# Altium schematic symbol library Schlib_IDC_Tester_v1.SchLib: 21 symbols
Pins are listed as number, name and electrical type; pins without a type are passive.

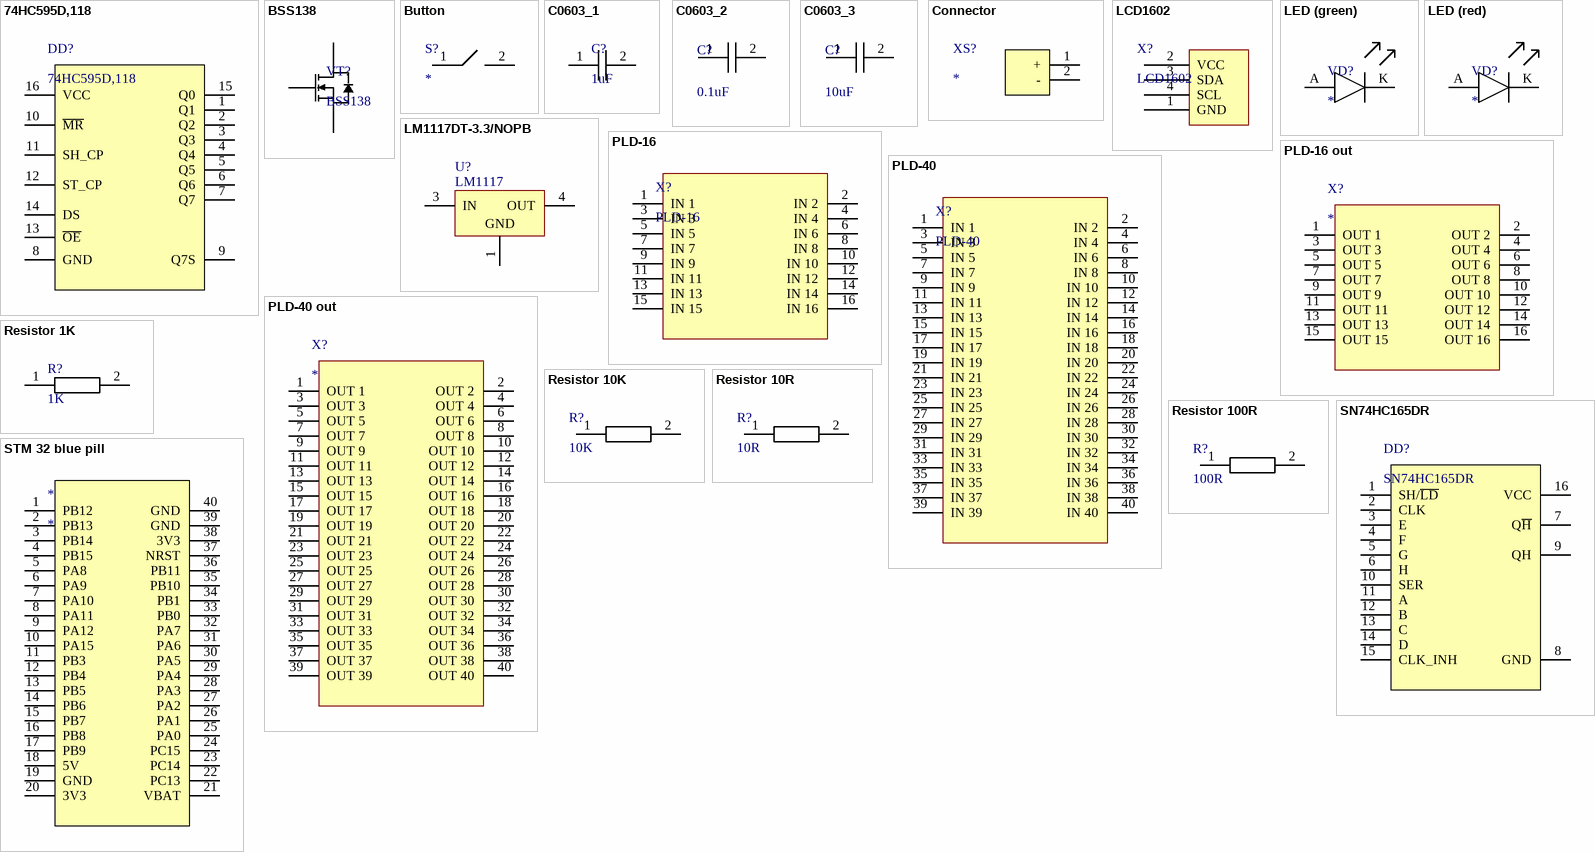
[diagram p0: symbols 74HC595D,118 to STM 32 blue pill]

## 74HC595D,118
designator DD?
74HC Series 6 V 3-State Surface Mount Shift Register - SOIC-16; Manufacturer: Nexperia; Added by: viskov2055@gmail.com; Mount_Type: SMD; Solder_Amount: 16; Supplier 1: Rs; Manufacturer Part Number: 74HC595D,118; RoHS: Yes; Category: Shift Registers; Stock 1: 7500; Pricing 1: 2500=32,44, 5000=31,895 (RUB); ComponentLink1URL: http://www.farnell.com/datasheets/2038613.pdf?src-supplier=Farnell; ComponentLink1Description: http://www.farnell.com/datasheets/2038613.pdf?src-supplier=Farnell; ComponentLink2URL: https://assets.nexperia.com/documents/data-sheet/74HC_HCT595.pdf?src-supplier=Digikey; ComponentLink2Description: https://assets.nexperia.com/documents/data-sheet/74HC_HCT595.pdf?src-supplier=Digikey; ComponentLink3URL: https://datasheet.octopart.com/74HC595D%2C118-Nexperia-datasheet-62292421.pdf?src-supplier=Newark; ComponentLink3Description: https://datasheet.octopart.com/74HC595D%2C118-Nexperia-datasheet-62292421.pdf?src-supplier=Newark; ComponentLink4URL: http://www.farnell.com/datasheets/2038613.pdf?src-supplier=Newark; ComponentLink4Description: http://www.farnell.com/datasheets/2038613.pdf?src-supplier=Newark; ComponentLink5URL: http://www.farnell.com/datasheets/2038613.pdf?src-supplier=Element14; ComponentLink5Description: http://www.farnell.com/datasheets/2038613.pdf?src-supplier=Element14; ComponentLink6URL: https://datasheet.octopart.com/74HC595D%2C118-Nexperia-datasheet-11979826.pdf?src-supplier=Element14; ComponentLink6Description: https://datasheet.octopart.com/74HC595D%2C118-Nexperia-datasheet-11979826.pdf?src-supplier=Element14; Supplier Part Number 1: 1707956; Created at: 13/02/2024; Mount: MOUNT; Pkg: SOIC-16; Part Number: 74HC595D,118
footprint Shift register 74HC165 or 74HC595
pins: 1 Q1, 2 Q2, 3 Q3, 4 Q4, 5 Q5, 6 Q6, 7 Q7, 8 GND, 9 Q7S, 10 ~{MR}, 11 SH_CP, 12 ST_CP, 13 ~{OE}, 14 DS, 15 Q0, 16 VCC

## BSS138
designator VT?
N-Channel Logic Level Enhancement Mode Field Effect Transistor; Solder_Amount: 3; Added_by: ma_lubushkin@teslatec.ru; Pkg: SOT-23; Part Number: BSS138; Mount: MOUNT; MountType: SMD; Created_at: 03/12/2019
footprint SOT-23-3
pins: 1 G, 2 S "fghg", 3 D
1 alternate drawing of the same symbol

## Button
designator S?
Part Number: PTS645SM43SMTR92LFS; Added by: viskov2055@gmail.com; Mpunt_Type: SMD; Solder_Amount: 4; Pkg: Button; Created at: 19/02/2024; Mount: MOUNT
footprint Button
pins: 1, 2

## C0603_1
designator C?, comment 1uF
Part Number: SMD CAP CER 1UF 25V X5R 0603 (CC0603KRX5R8BB105); Added by: viskov2055@gmail.com; Mount_Type: SMD; Solder_Amount: 2; Pkg: 0603; Created at: 16/02/2024; Mount: MOUNT
footprint Capacitor 0603
pins: 1, 2

## C0603_2
designator C?, comment 0.1uF
Capacitor SMD 0603; Part Number: CAP CER 0603 0.1uF 16V 10%; Added_by: ridel_av@teslatec.ru; Solder_Amount: 2; Pkg: 0603; Mount: MOUNT; MountType: SMD
footprint Capacitor 0603
pins: 1, 2

## C0603_3
designator C?, comment 10uF
Capacitor SMD 0603; Part Number: CAP CER 0603 10uF 16V 10%; Added_by: ridel_av@teslatec.ru; Solder_Amount: 2; Pkg: 0603; Mount: MOUNT; MountType: SMD
footprint Capacitor 0603
pins: 1, 2

## Connector
designator XS?
Part Number: 282836; Added by: viskov2055@gmail.com; Mount_Type: THM; Solder_Amount: 2; Pkg: connector (bulk); Created at: 13/02/2024; Mount: MOUNT
footprint Connector
pins: 1 +, 2 -

## LCD1602
designator X?
Part Number: LCD1602I2C (green light); Added by: viskov2055@gmail.com; Mount_Type: THM; Solder_Amount: 4; Pkg: board (connector); Created at: 19/02/2024; Mount: MOUNT
footprint LCD1602
pins: 1 GND, 2 VCC, 3 SDA, 4 SCL

## LED (green)
designator VD?
LED Uni-Color Green 515nm 2-Pin SMD T/R; Manufacturer: Kingbright; Manufacturer Part Number: APG1608ZGCK; Lens Style: Flat; Lens Transparency: Clear; Luminous Intensity: 400mcd; Forward Voltage: 3.3V; Test Current: 20mA; Viewing Angle: 130°; Dominant Wavelength: 525nm; Lens Size: 0.8mm; Added by: viskov2055@gmail.com; Solder_Amount: 2; Pkg: 0603; RoHS: Yes; Category: LEDs; Stock 1: 44996; Pricing 1: 1=0,6, 10=0,368, 100=0,2114, 1000=0,16544, 2000=0,15165 (USD); MountType: SMD; Case/Package: 0603; Color: Green; Case Code (Imperial): 0603; Case Code (Metric): 1608; Packaging: Tape and Reel; Length: 1.6mm; Width: 0.8mm; Height: 0.28mm; RoHS Compliant: Yes; ComponentLink1URL: https://datasheet.octopart.com/APG1608ZGCK-Kingbright-datasheet-153682089.pdf?src-supplier=Future+Electronics; ComponentLink1Description: https://datasheet.octopart.com/APG1608ZGCK-Kingbright-datasheet-153682089.pdf?src-supplier=Future+Electronics; ComponentLink2URL: http://www.kingbrightusa.com/images/catalog/SPEC/APG1608ZGCK.pdf?src-supplier=Digikey; ComponentLink2Description: http://www.kingbrightusa.com/images/catalog/SPEC/APG1608ZGCK.pdf?src-supplier=Digikey; ComponentLink3URL: https://datasheet.octopart.com/APG1608ZGCK-Kingbright-datasheet-137408059.pdf?src-supplier=Sager+Electronics; ComponentLink3Description: https://datasheet.octopart.com/APG1608ZGCK-Kingbright-datasheet-137408059.pdf?src-supplier=Sager+Electronics; Supplier Part Number 1: 754-2113-1-ND; Created at: 13/02/2024; Mount: MOUNT; Part Number: APG1608ZGCK; Supplier 1: Digikey
footprint Led 0603 - duplicate
pins: A 1, K 2

## LED (red)
designator VD?
Part Number: APT1608SURCK; Added by: viskov2055@gmail.com; Solder_Amount: 2; Pkg: 0603; Mount_Type: SMD; Created at: 13/02/2024; Mount: MOUNT
footprint Led 0603 RED
pins: A 1, K 2

## LM1117DT-3.3/NOPB
designator U?, comment LM1117
800mA Low-Dropout Linear Regulator, 3-pin TO-252, Pb-Free; Part Number: LM1117DT-3.3/NOPB; Added_by: ridel_av@teslatec.ru; Solder_Amount: 3; Pkg: TD03B_N; Mount: MOUNT; MountType: SMD
footprint TO-252
pins: 1 GND (power), 3 IN (power), 4 OUT (power)

## PLD-16
designator X?
Part Number: DS1021-2x8; Added by: viskov2055@gmail.com; Mount_Type: THM; Solder_Amount: 16; Created at: 13/02/2024; Mount: MOUNT; Pkg: PLD-16
footprint PLD-16
pins: 1 IN 1, 2 IN 2, 3 IN 3, 4 IN 4, 5 IN 5, 6 IN 6, 7 IN 7, 8 IN 8, 9 IN 9, 10 IN 10, 11 IN 11, 12 IN 12, 13 IN 13, 14 IN 14, 15 IN 15, 16 IN 16

## PLD-16 out
designator X?
Part Number: DS1021-2x8; Added by: viskov2055@gmail.com; Mount_Type: THM; Solder_Amount: 16; Pkg: PLD-16; Created at: 16/02/2024; Mount: MOUNT
footprint PLD-16
pins: 1 OUT 1, 2 OUT 2, 3 OUT 3, 4 OUT 4, 5 OUT 5, 6 OUT 6, 7 OUT 7, 8 OUT 8, 9 OUT 9, 10 OUT 10, 11 OUT 11, 12 OUT 12, 13 OUT 13, 14 OUT 14, 15 OUT 15, 16 OUT 16

## PLD-40
designator X?
Part Number: DS1021-2x20; Added by: viskov2055@gmail.com; Mount_Type: THM; Solder_Amount: 40; Created at: 13/02/2024; Mount: MOUNT; Pkg: PLD-40
footprint PLD-40
pins: 1 IN 1, 2 IN 2, 3 IN 3, 4 IN 4, 5 IN 5, 6 IN 6, 7 IN 7, 8 IN 8, 9 IN 9, 10 IN 10, 11 IN 11, 12 IN 12, 13 IN 13, 14 IN 14, 15 IN 15, 16 IN 16, 17 IN 17, 18 IN 18, 19 IN 19, 20 IN 20, 21 IN 21, 22 IN 22, 23 IN 23, 24 IN 24, 25 IN 25, 26 IN 26, 27 IN 27, 28 IN 28, 29 IN 29, 30 IN 30, 31 IN 31, 32 IN 32, 33 IN 33, 34 IN 34, 35 IN 35, 36 IN 36, 37 IN 37, 38 IN 38, 39 IN 39, 40 IN 40

## PLD-40 out
designator X?
Part Number: DS1021-2x20; Added by: viskov2055@gmail.com; Mount_Type: THM; Solder_Amount: 40; Pkg: PLD-40; Created at: 16/02/2024; Mount: MOUNT
footprint PLD-40
pins: 1 OUT 1, 2 OUT 2, 3 OUT 3, 4 OUT 4, 5 OUT 5, 6 OUT 6, 7 OUT 7, 8 OUT 8, 9 OUT 9, 10 OUT 10, 11 OUT 11, 12 OUT 12, 13 OUT 13, 14 OUT 14, 15 OUT 15, 16 OUT 16, 17 OUT 17, 18 OUT 18, 19 OUT 19, 20 OUT 20, 21 OUT 21, 22 OUT 22, 23 OUT 23, 24 OUT 24, 25 OUT 25, 26 OUT 26, 27 OUT 27, 28 OUT 28, 29 OUT 29, 30 OUT 30, 31 OUT 31, 32 OUT 32, 33 OUT 33, 34 OUT 34, 35 OUT 35, 36 OUT 36, 37 OUT 37, 38 OUT 38, 39 OUT 39, 40 OUT 40

## Resistor 1K
designator R?, comment 1K
Part Number: SMD RES 1K OHM 1%±100ppm/°C 0603 (RMCF0603FT1K00); Added by: viskov2055@gmail.com; Mount_Type: SMD; Solder_Amount: 2; Pkg: 0603; Created at: 13/02/2024; Mount: MOUNT
footprint Resistor 0603
pins: 1, 2

## Resistor 10K
designator R?, comment 10K
Part Number: SMD RES 10K OHM 1%±100ppm/°C 0603 (RMCF0603FT10K0); Added by: viskov2055@gmail.com; Mount_Type: SMD; Solder_Amount: 2; Pkg: 0603; Created at: 15/02/2024; Mount: MOUNT
footprint Resistor 0603
pins: 1, 2

## Resistor 10R
designator R?, comment 10R
Part Number: SMD RES 10 OHM 1% ±100ppm/°C 0603 (RMCF0603FT10R); Added by: viskov2055@gmail.com; Mount_Type: SMD; Solder_Amount: 2; Pkg: 0603; Created at: 19/02/2024; Mount: MOUNT
footprint Resistor 0603
pins: 1, 2

## Resistor 100R
designator R?, comment 100R
Part Number: SMD RES 100 OHM 1% ±100ppm/°C 0603 (RMCF0603FT100R); Added by: viskov2055@gmail.com; Mount_Type: SMD; Solder_Amount: 2; Pkg: 0603; Created at: 19/02/2024; Mount: MOUNT
footprint Resistor 0603
pins: 1, 2

## SN74HC165DR
designator DD?
IC 8-BIT SHIFT REGISTER 16-SOIC; Manufacturer: Texas Instruments; Added by: viskov2055@gmail.com; Mount_Type: SMD; Solder_Amount: 16; Supplier 1: Digikey; Manufacturer Part Number: SN74HC165DR; RoHS: Yes; Category: Shift Registers; Stock 1: 2933; Pricing 1: 1=0,47, 10=0,357, 25=0,322, 100=0,2226, 250=0,18744, 500=0,1523, 1000=0,11716 (USD); ComponentLink1URL: https://datasheet.ciiva.com/15093/getdatasheetpartid-251161-15093655.pdf?src-supplier=Verical; ComponentLink1Description: https://datasheet.ciiva.com/15093/getdatasheetpartid-251161-15093655.pdf?src-supplier=Verical; ComponentLink2URL: https://datasheet.ciiva.com/34301/915180-34301754.pdf?src-supplier=Jameco; ComponentLink2Description: https://datasheet.ciiva.com/34301/915180-34301754.pdf?src-supplier=Jameco; ComponentLink3URL: https://datasheet.ciiva.com/41456/001016679-da-01-en-ic-8bit-shft-reg-sn74hc165dr-soic-16-tid-41456900.pdf?src-supplier=Conrad; ComponentLink3Description: https://datasheet.ciiva.com/41456/001016679-da-01-en-ic-8bit-shft-reg-sn74hc165dr-soic-16-tid-41456900.pdf?src-supplier=Conrad; ComponentLink4URL: https://datasheet.ciiva.com/46397/1831348-46397223.pdf?src-supplier=Element14; ComponentLink4Description: https://datasheet.ciiva.com/46397/1831348-46397223.pdf?src-supplier=Element14; ComponentLink5URL: https://datasheet.ciiva.com/14295/sn54hc165-14295050.pdf?src-supplier=Avnet; ComponentLink5Description: https://datasheet.ciiva.com/14295/sn54hc165-14295050.pdf?src-supplier=Avnet; ComponentLink6URL: https://datasheet.ciiva.com/14295/sn54hc165-14295052.pdf?src-supplier=Avnet; ComponentLink6Description: https://datasheet.ciiva.com/14295/sn54hc165-14295052.pdf?src-supplier=Avnet; ComponentLink7URL: https://datasheet.ciiva.com/1886/sn74hc165-1886212.pdf?src-supplier=Digikey; ComponentLink7Description: https://datasheet.ciiva.com/1886/sn74hc165-1886212.pdf?src-supplier=Digikey; ComponentLink8URL: https://datasheet.ciiva.com/1886/sn74hc165-1886213.pdf?src-supplier=Digikey; ComponentLink8Description: https://datasheet.ciiva.com/1886/sn74hc165-1886213.pdf?src-supplier=Digikey; ComponentLink9URL: https://datasheet.ciiva.com/1886/sn74hc165-1886214.pdf?src-supplier=Digikey; ComponentLink9Description: https://datasheet.ciiva.com/1886/sn74hc165-1886214.pdf?src-supplier=Digikey; Supplier Part Number 1: 296-8250-1-ND; Created at: 13/02/2024; Mount: MOUNT; Pkg: 16-SOIC; Part number: SN74HC165DR
footprint Shift register 74HC165 or 74HC595
pins: 1 SH/~{LD}, 2 CLK, 3 E, 4 F, 5 G, 6 H, 7 Q~{H}, 8 GND, 9 QH, 10 SER, 11 A, 12 B, 13 C, 14 D, 15 CLK_INH, 16 VCC

## STM 32 blue pill
designator *
Part Number: STM32F103C8T6 (blue pill); Added by: viskov2055@gmail.com; Mount_Type: THM; Solder_Amount: 40; Pkg: PBS-40 (STM32 blue pill); Created at: 13/02/2024; Mount: MOUNT
footprint STM32 blue pill
pins: 1 PB12, 2 PB13, 3 PB14, 4 PB15, 5 PA8, 6 PA9, 7 PA10, 8 PA11, 9 PA12, 10 PA15, 11 PB3, 12 PB4, 13 PB5, 14 PB6, 15 PB7, 16 PB8, 17 PB9, 18 5V, 19 GND, 20 3V3, 21 VBAT, 22 PC13, 23 PC14, 24 PC15, 25 PA0, 26 PA1, 27 PA2, 28 PA3, 29 PA4, 30 PA5, 31 PA6, 32 PA7, 33 PB0, 34 PB1, 35 PB10, 36 PB11, 37 NRST, 38 3V3, 39 GND, 40 GND